# Altium footprint library Switch$.PcbLib: 117 footprints (part 7 of 8)
Each footprint in its own frame and in the unit in brackets; x right, y up, seen from the top. Pads: shape width x height; smd on the part's side, far side on the other; paste and mask are expansions set on the pad; w line width, h text height; cw(c..) or ccw(c..) is an arc to the next point about the centre after c.
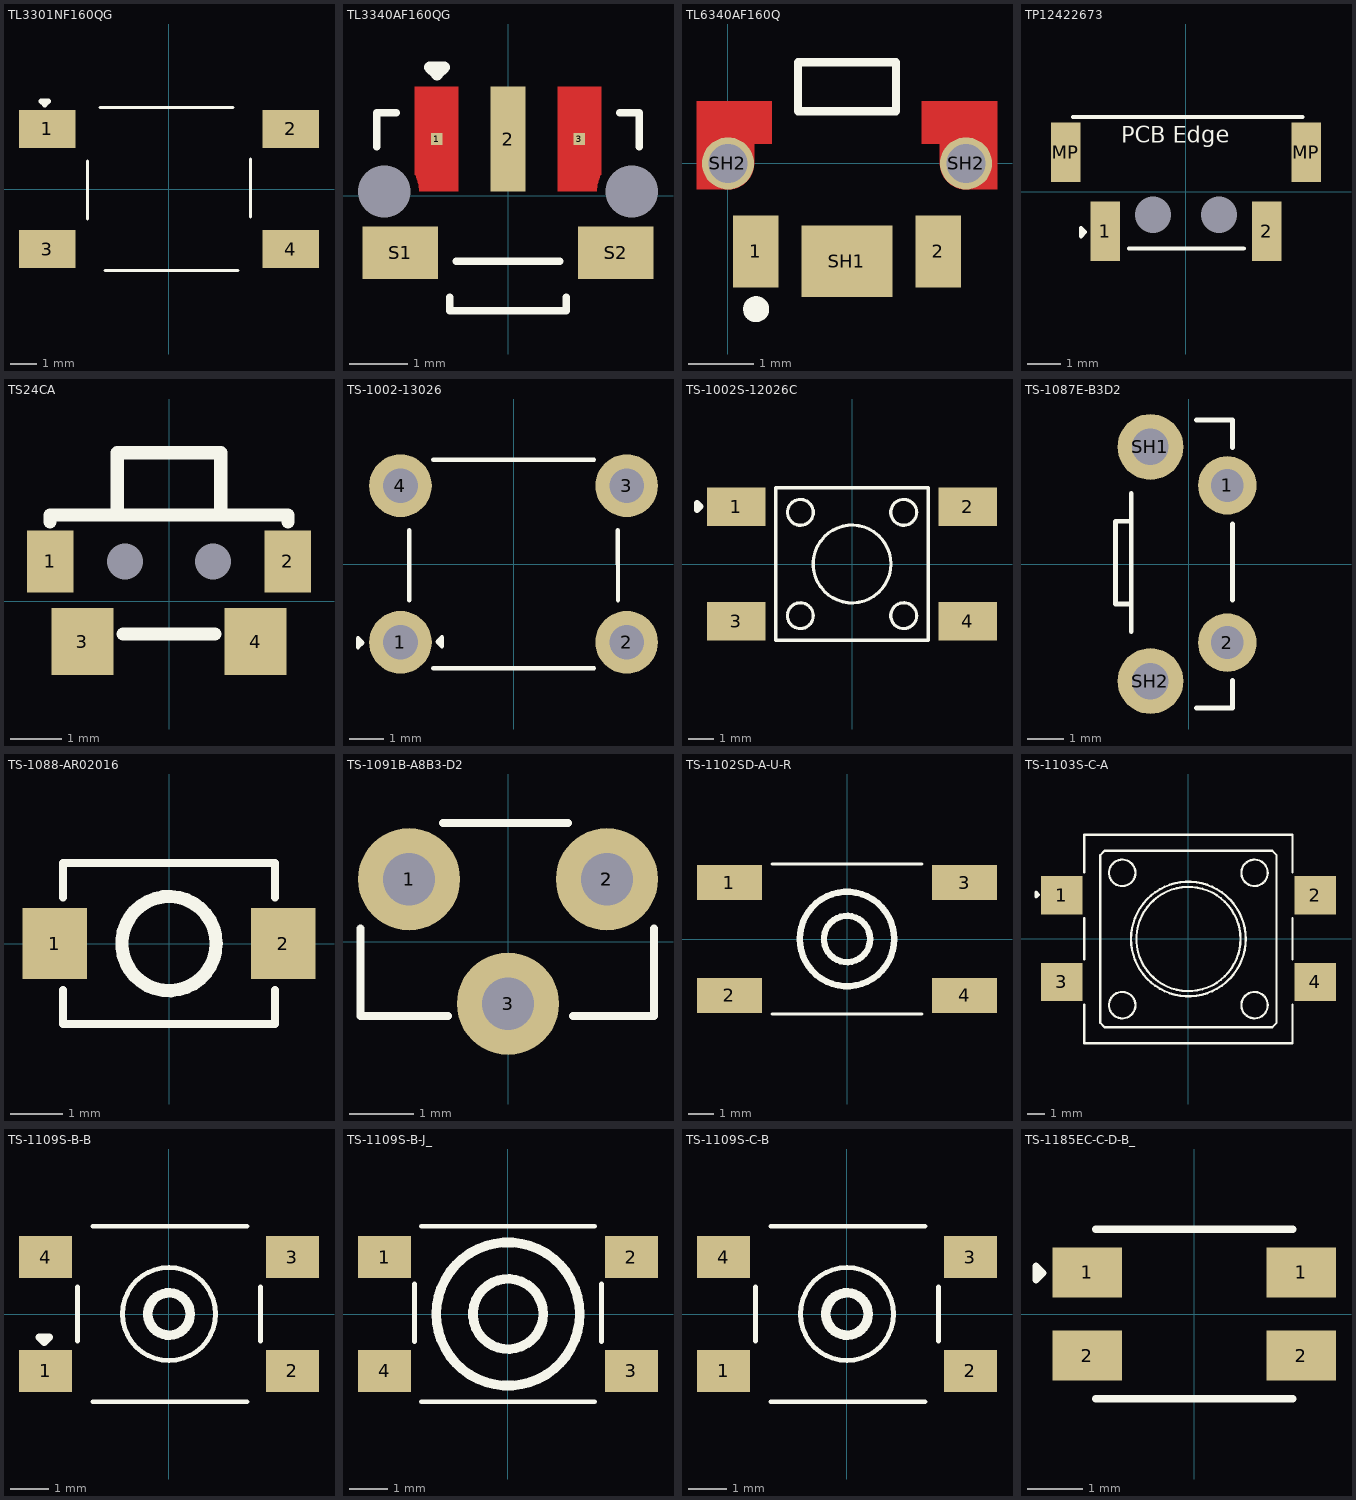
[diagram p6: the footprints below, top view; thin cyan lines are the x and y axes]

## TL3301NF160QG [mm]
pads (4):
  rect 2.12x1.42 smd: 1(-4.55,2.25) 2(4.55,2.25) 3(-4.55,-2.25) 4(4.55,-2.25)
Top Overlay:
  lines w0.127: -3.048,-1.118 -3.048,1.041 ; -2.565,3.048 2.388,3.048 ; -2.388,-3.048 2.565,-3.048 ; 3.048,-1.041 3.048,1.118
  lines w0.2: -4.775,3.277 -4.648,3.15 -4.521,3.277 -4.775,3.277
3D body "TL3301NFxxxxG.stp": height 4.41, standoff 0.01, extent -5,-3 5,3

## TL3340AF160QG [mm]
pads (7):
  rect 0.2x0.2 smd paste-1 mask+0: 1(-1.225,0.975) 3(1.225,0.975)
  rect 0.6x1.8 smd: 2(0,0.975)
  rect 1.3x0.9 smd: S1(-1.85,-0.975) S2(1.85,-0.975)
  round 0 hole 0.9 unplated: ""(-2.125,0.075) ""(2.125,0.075)
Top Layer:
  region: 1.6,0.375 1.6,0.365 1.595,0.358 1.587,0.343 1.579,0.327 1.572,0.311 1.569,0.302 1.565,0.292 1.557,0.271 1.551,0.25 1.545,0.228 1.543,0.218 1.54,0.209 1.536,0.191 1.533,0.173 1.531,0.155 1.53,0.146 1.529,0.138 1.526,0.12 1.525,0.102 1.525,0.084 1.525,0.075 0.85,0.075 0.85,1.875 1.6,1.875
  region: -0.85,0.075 -1.525,0.075 -1.525,0.084 -1.525,0.102 -1.526,0.12 -1.529,0.138 -1.53,0.146 -1.531,0.155 -1.533,0.173 -1.536,0.191 -1.54,0.209 -1.543,0.218 -1.545,0.228 -1.551,0.25 -1.557,0.271 -1.565,0.292 -1.569,0.302 -1.572,0.311 -1.579,0.327 -1.587,0.343 -1.595,0.358 -1.6,0.365 -1.6,0.375 -1.6,1.875 -0.85,1.875
Top Overlay:
  lines w0.127: -2.25,0.839 -2.25,1.425 -1.913,1.425 ; -1,-1.738 -1,-1.975 1,-1.975 1,-1.738 ; -0.887,-1.125 0.887,-1.125 ; 1.913,1.425 2.25,1.425 2.25,0.839
  lines w0.2: -1.346,2.21 -1.219,2.083 -1.092,2.21 -1.346,2.21
3D body "TL3340AF160QG.step": height 3.3, standoff -0.46, extent -2.25,-2.05 2.25,1.615

## TL6340AF160Q [mm]
pads (5):
  rect 0.7x1.1 smd: 1(0.425,-1.35) 2(3.225,-1.35)
  rect 1.4x1.1 smd: SH1(1.825,-1.5)
  round 0.8 hole 0.6 mask+0: SH2(0,0) SH2(3.65,0)
Top Layer:
  region: 0.675,0.3 0.4,0.3 0.4,0 0.399,-0.021 0.398,-0.042 0.395,-0.063 0.391,-0.083 0.386,-0.104 0.38,-0.124 0.373,-0.143 0.365,-0.163 0.356,-0.182 0.346,-0.2 0.335,-0.218 0.324,-0.235 0.311,-0.252 0.297,-0.268 0.283,-0.283 0.268,-0.297 0.252,-0.311 0.235,-0.324 0.218,-0.335 0.2,-0.346 0.182,-0.356 0.163,-0.365 0.143,-0.373 0.124,-0.38 0.104,-0.386 0.083,-0.391 0.063,-0.395 0.042,-0.398 0.021,-0.399 0,-0.4 -0.475,-0.4 -0.475,0.95 0.675,0.95
  region: 4.125,-0.4 3.65,-0.4 3.629,-0.399 3.608,-0.398 3.587,-0.395 3.567,-0.391 3.546,-0.386 3.526,-0.38 3.507,-0.373 3.487,-0.365 3.468,-0.356 3.45,-0.346 3.432,-0.335 3.415,-0.324 3.398,-0.311 3.382,-0.297 3.367,-0.283 3.353,-0.268 3.339,-0.252 3.326,-0.235 3.315,-0.218 3.304,-0.2 3.294,-0.182 3.285,-0.163 3.277,-0.143 3.27,-0.124 3.264,-0.104 3.259,-0.083 3.255,-0.063 3.252,-0.042 3.251,-0.021 3.25,0 3.25,0.3 2.975,0.3 2.975,0.95 4.125,0.95
Top Overlay:
  circle w0.2: c0.432,-2.235 r0.1
  lines w0.127: 1.075,0.8 1.075,1.55 2.575,1.55 2.575,0.8 ; 1.075,0.8 2.575,0.8 ; 1.075,0.8 2.575,0.8 ; 1.075,0.8 2.575,0.8
3D body "step_temp.STEP": height 1.55, standoff -0.45, extent -0.1,-1.35 3.75,1.55

## TP12422673 [mm]
pads (6):
  rect 0.9x1.8 smd: 1(-2.45,-1.2) 2(2.45,-1.2) MP(-3.65,1.2) MP(3.65,1.2)
  round 0 hole 1.1 unplated: MH(-1,-0.7) MH(1,-0.7)
Top Overlay:
  lines w0.127: -3.429,2.261 3.531,2.261 ; -1.727,-1.727 1.753,-1.727 ; -3.187,-1.352 -3.06,-1.225 -3.187,-1.098 -3.187,-1.352
  text "PCB Edge" at -1.958,1.485 h0.5
3D body "TP12422673.STEP": height 3.52, standoff -0.8, extent -3.97,-1.967 3.98,5.45

## TS24CA [mm]
pads (6):
  rect 0.9x1.2 smd paste+0 mask+0.051: 1(-2.3,0.775) 2(2.3,0.775)
  rect 1.2x1.3 smd paste+0 mask+0.051: 3(-1.675,-0.775) 4(1.675,-0.775)
  round 0 hole 0.7 unplated paste-2539.97: ""(-0.85,0.775) ""(0.85,0.775)
Top Overlay:
  lines w0.254: -2.3,1.537 -2.3,1.675 2.3,1.675 2.3,1.537 ; -1,1.675 -1,2.875 1,2.875 1,1.675 ; -0.889,-0.625 0.889,-0.625

## TS-1002-13026 [mm]
pads (4):
  round 1.8 hole 1: 1(-3.25,-2.25) 2(3.25,-2.25) 3(3.25,2.25) 4(-3.25,2.25)
Top Overlay:
  lines w0.127: -3,-1.041 -2.997,0.965 ; -2.311,-3 0,-3 2.311,-3 ; -2.311,3 0,3 2.311,3 ; 2.997,0.965 3,-1.041 ; -4.47,-2.388 -4.343,-2.261 -4.47,-2.134 -4.47,-2.388 ; -2.184,-2.235 -2.057,-2.108 -2.057,-2.362 -2.184,-2.235

## TS-1002S-12026C [mm]
pads (4):
  rect 2.3x1.5 smd: 1(-4.55,2.25) 2(4.55,2.25) 3(-4.55,-2.25) 4(4.55,-2.25)
Top Overlay:
  circle w0.127: c0,0 r1.529
  circle w0.127: c2.032,-2.032 r0.508
  circle w0.127: c-2.032,-2.032 r0.508
  circle w0.127: c2.032,2.032 r0.508
  circle w0.127: c-2.03,2.03 r0.508
  lines w0.127: -3,-3 3,-3 3,3 -3,3 -3,-3
  lines w0.254: -6.096,2.134 -5.969,2.261 -6.096,2.388 -6.096,2.134
3D body "XUNPU TS-1002S-12026C.STEP": height 12, standoff 0, extent -4.5,-3 4.5,3

## TS-1087E-B3D2 [mm]
pads (4):
  round 1.6 hole 0.9: 1(1.05,2.15) 2(1.05,-2.15)
  round 1.8 hole 1: SH1(-1.05,3.2) SH2(-1.05,-3.2)
Top Overlay:
  lines w0.127: -1.579,-1.092 -2.007,-1.092 -2.007,1.168 -1.579,1.168 -1.575,1.164 ; -1.575,-1.854 -1.575,1.93 ; 0.203,-3.937 1.194,-3.937 1.194,-3.175 ; 0.203,3.937 1.194,3.937 1.194,3.175 ; 1.194,-0.991 1.194,1.092
3D body "TS-1087E-B3D2.STEP": height 3.75, standoff -3.05, extent -1.928,-3.85 1.182,3.85

## TS-1088-AR02016 [mm]
pads (2):
  rect 1.23x1.36 smd: 1(-2.185,0) 2(2.185,0)
Top Overlay:
  circle w0.254: c0,0 r0.9
  lines w0.152: -2.026,-0.883 -2.026,-1.541 2.026,-1.541 2.026,-0.883 ; -2.026,0.883 -2.026,1.541 2.026,1.541 2.026,0.883
3D body "C720477.step": height 1.95, standoff 0, extent -2.4,-1.45 2.4,1.45

## TS-1091B-A8B3-D2 [mm]
pads (4):
  round 1.6 hole 0.82: 1(-1.55,0.975) 2(1.55,0.975) 2(1.55,0.975) 3(0,-0.975)
Top Overlay:
  lines w0.127: -2.311,0.203 -2.311,-1.168 -0.94,-1.168 ; -1.016,1.854 0.94,1.854 ; 1.016,-1.168 2.286,-1.168 2.286,0.203
3D body "TS-1091B-A8B3-D2.STEP": height 4.75, standoff -1.75, extent -2.275,-5.192 2.225,1.808

## TS-1102SD-A-U-R [mm]
pads (4):
  rect 2.6x1.4 smd: 1(-4.7,2.25) 2(-4.7,-2.25) 3(4.7,2.25) 4(4.7,-2.25)
Top Overlay:
  circle w0.254: c0,0 r1.888
  circle w0.254: c0,0 r0.925
  lines w0.127: -3,-3 3,-3 ; -3,3 3,3

## TS-1103S-C-A [mm]
pads (4):
  rect 2.4x2.2 smd paste+0 mask+0.05: 1(-7.3,2.5) 2(7.3,2.5) 3(-7.3,-2.5) 4(7.3,-2.5)
Top Overlay:
  circle w0.127: c0,-0.025 r3
  circle w0.127: c0,-0.025 r3.302
  circle w0.127: c3.81,-3.835 r0.762
  circle w0.127: c-3.81,-3.835 r0.762
  circle w0.127: c3.81,3.785 r0.762
  circle w0.127: c-3.81,3.785 r0.762
  lines w0.127: -6,-3.808 -6,-6.025 6,-6.025 6,-3.808 ; -6,-1.192 -6,1.192 ; -6,3.808 -6,5.975 6,5.975 6,3.808 ; 6,-1.192 6,1.192 ; -5.08,-4.851 -5.08,4.801 -4.826,5.055 4.826,5.055 5.08,4.801 5.08,-4.851 4.826,-5.105 -4.826,-5.105 -5.08,-4.851
  lines w0.2: -8.776,2.4 -8.776,2.654 -8.649,2.527 -8.776,2.4
3D body "C318917.step": height 5.7, standoff 0, extent -7.6,-6 7.6,6

## TS-1109S-B-B [mm]
pads (4):
  rect 1.4x1.1 smd: 1(-3.25,-1.5) 2(3.25,-1.5) 3(3.25,1.5) 4(-3.25,1.5)
Top Overlay:
  circle w0.127: c0,0 r1.226
  circle w0.254: c0,0 r0.557
  lines w0.127: -2.413,-0.711 -2.413,0.711 ; -2.007,-2.311 2.057,-2.311 ; -2.007,2.311 2.057,2.311 ; 2.413,-0.711 2.413,0.711
  lines w0.2: -3.414,-0.61 -3.16,-0.61 -3.287,-0.737 -3.414,-0.61
3D body "ts-1109s-c-b.stp": height 4.3, standoff 0, extent -3.5,-2.25 3.5,2.25

## TS-1109S-B-J_ [mm]
pads (4):
  rect 1.4x1.1 smd: 1(-3.25,1.5) 2(3.25,1.5) 3(3.25,-1.5) 4(-3.25,-1.5)
Top Overlay:
  circle w0.254: c0,0 r0.925
  circle w0.254: c0,0 r1.888
  lines w0.127: -2.459,-0.73 -2.459,0.794 ; -2.286,-2.311 2.286,-2.311 ; -2.286,2.311 2.286,2.311 ; 2.459,-0.73 2.459,0.794
3D body "TS-1109S-B-J.STEP": height 7.12, standoff 0.12, extent -3.5,-2.25 3.5,2.25

## TS-1109S-C-B [mm]
pads (4):
  rect 1.4x1.1 smd: 1(-3.25,-1.5) 2(3.25,-1.5) 3(3.25,1.5) 4(-3.25,1.5)
Top Overlay:
  circle w0.127: c0,0 r1.226
  circle w0.254: c0,0 r0.557
  lines w0.127: -2.413,-0.711 -2.413,0.711 ; -2.007,-2.311 2.057,-2.311 ; -2.007,2.311 2.057,2.311 ; 2.413,-0.711 2.413,0.711
3D body "ts-1109s-c-b.stp": height 4.3, standoff 0, extent -3.5,-2.25 3.5,2.25

## TS-1185EC-C-D-B_ [mm]
pads (4):
  rect 1.25x0.9 smd: 1(-1.925,0.75) 1(1.925,0.75) 2(-1.925,-0.75) 2(1.925,-0.75)
Top Overlay:
  lines w0.127: -1.778,-1.524 1.778,-1.524 ; -1.778,1.524 1.778,1.524 ; -2.845,0.61 -2.845,0.864 -2.718,0.737 -2.845,0.61
3D body "ts-1185ec-c-d-b.stp": height 2, standoff 0, extent -2.325,-1.5 2.325,1.5